# Altium footprint library BOARD_ADS _V2.0 (1).PcbLib: 14 footprints
Each footprint in its own frame and in the unit in brackets; x right, y up, seen from the top. Pads: shape width x height; smd on the part's side, far side on the other; paste and mask are expansions set on the pad; w line width, h text height; cw(c..) or ccw(c..) is an arc to the next point about the centre after c.
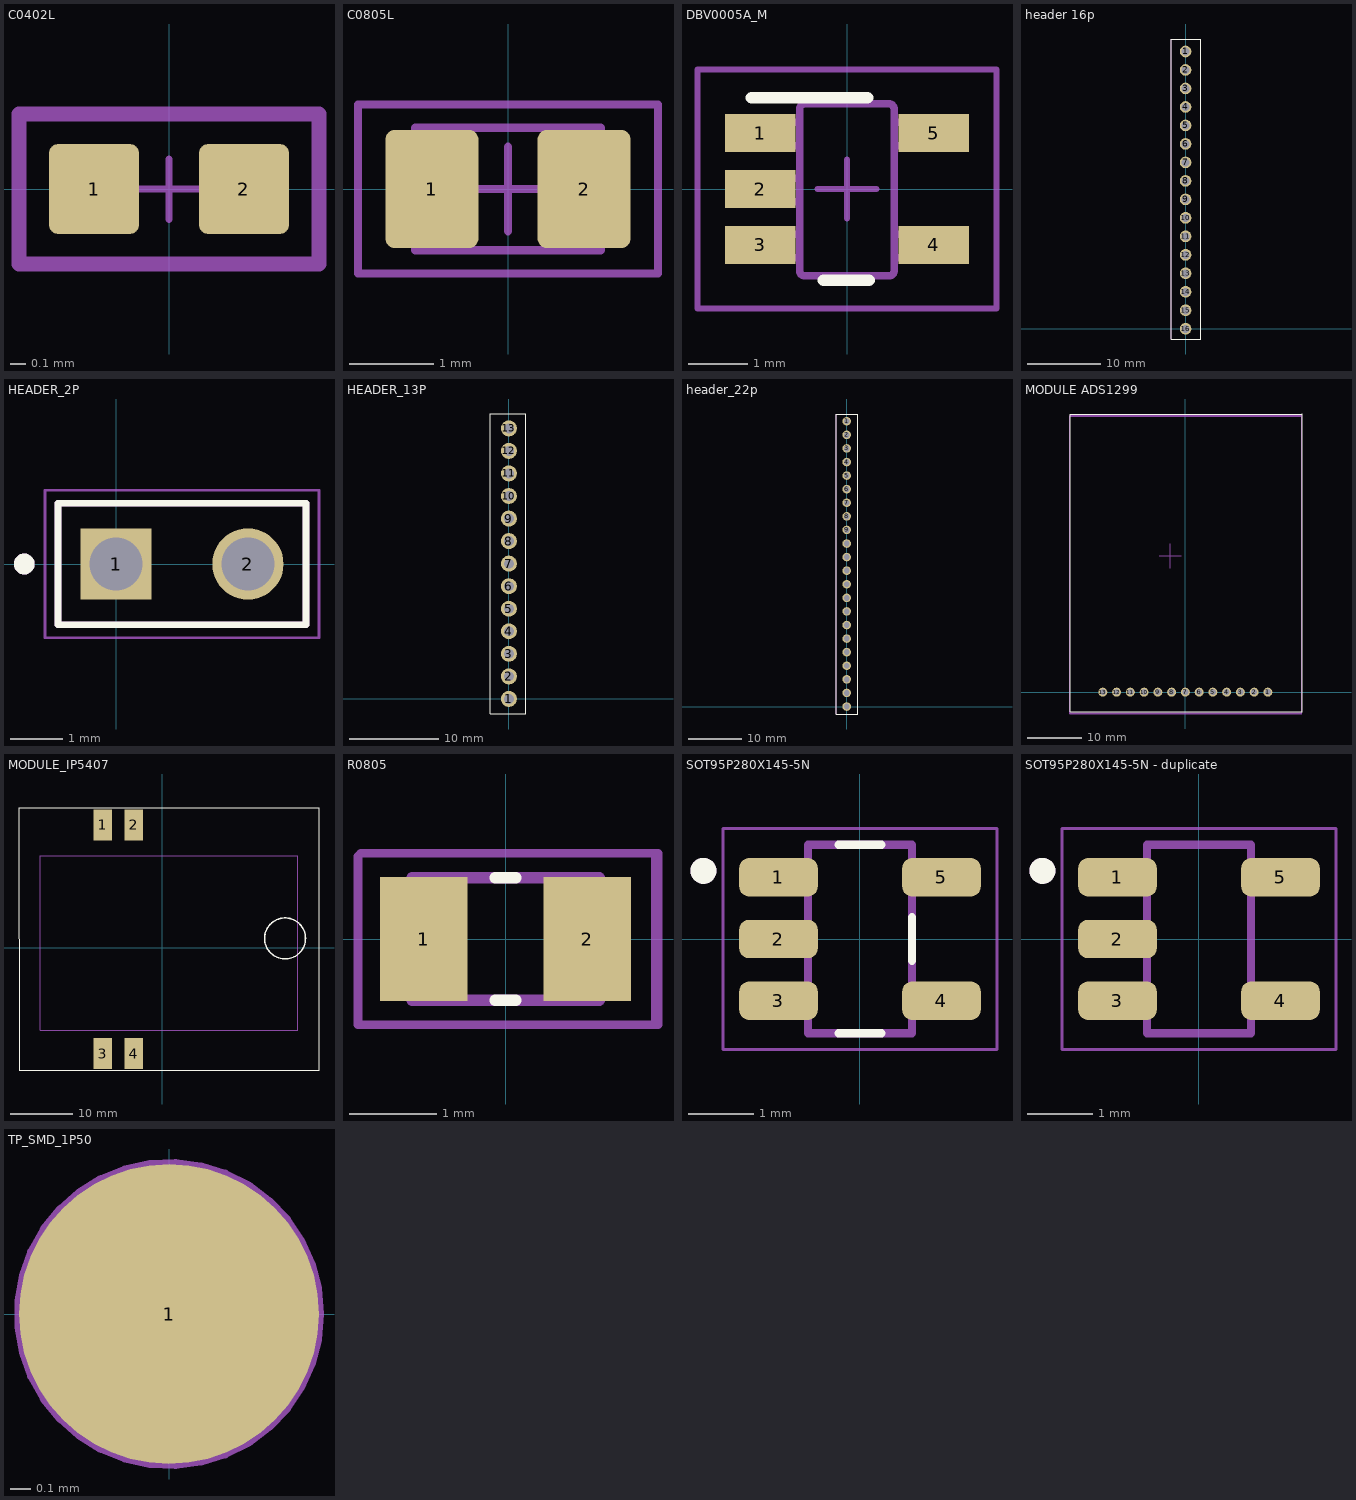
[diagram p0: the footprints below, top view; thin cyan lines are the x and y axes]

## C0402L [mm]
height 0.7
pads (2):
  rrect20% 0.6x0.6 smd paste+0.05 mask+0.05: 1(-0.5,0) 2(0.5,0)
Mechanical 5:
  lines w0.1: -1,-0.5 -1,0.5 1,0.5 1,-0.5 -1,-0.5
  text ".Designator" at -0.725,-0.225 h0.7
Top Component Center:
  lines w0.05: -0.2,0 0.2,0 ; 0,-0.2 0,0.2 ; -1,-0.5 -1,0.5 1,0.5 1,-0.5 -1,-0.5
3D body "User Library-Capacitor 0402.step": height 0.49, standoff -0.01, extent -0.5,-0.25 0.5,0.25

## C0805L [mm]
height 0.7
pads (2):
  rrect20% 1.1x1.4 smd mask+0.05: 1(-0.9,0) 2(0.9,0)
Mechanical 5:
  lines w0.1: -1.775,-1 1.775,-1 1.775,1 -1.775,1 -1.775,-1
  text ".Designator" at -1.357,-0.413 h1.32
Mechanical 13:
  lines w0.1: -0.65,-0.725 -0.65,0.725 ; 0.65,-0.725 0.65,0.725 ; -1.1,-0.725 1.1,-0.725 1.1,0.725 -1.1,0.725 -1.1,-0.725
Top Component Center:
  lines w0.1: -0.5,0 0.5,0 ; 0,-0.5 0,0.5 ; -1.775,-1 1.775,-1 1.775,1 -1.775,1 -1.775,-1
3D body: height 1.1, standoff 0, extent -1.099,-0.724 -0.651,0.724
3D body: height 1.1, standoff 0, extent -0.649,-0.724 0.649,0.724
3D body: height 1.1, standoff 0, extent 0.651,-0.724 1.099,0.724

## DBV0005A_M [mm]
pads (5):
  rect 1.2x0.65 smd paste+0 mask+0.051: 1(-1.475,0.95) 2(-1.475,0) 3(-1.475,-0.95) 4(1.475,-0.95) 5(1.475,0.95)
Top Overlay:
  lines w0.2: -1.625,1.55 0.35,1.55 ; -0.4,-1.55 0.375,-1.55
Mechanical 5:
  lines w0.1: -2.54,-2.032 2.54,-2.032 2.54,2.032 -2.54,2.032 -2.54,-2.032
  text ".Designator" at -0.635,-0.127 h1.52
Mechanical 13:
  lines w0.127: -0.801,1.371 cw(c-0.725,1.37) -0.725,1.446 ; -0.801,1.37 -0.801,-1.399 -0.801,-1.4 ccw(c-0.725,-1.399) -0.725,-1.475 ; -0.801,1.37 -0.801,1.371 ; -0.725,-1.475 -0.725,-1.475 ; -0.725,-1.475 0.723,-1.475 0.724,-1.475 ccw(c0.723,-1.399) 0.799,-1.4 0.799,-1.399 0.799,1.37 ; -0.725,1.446 0.723,1.446 0.724,1.446 cw(c0.723,1.37) 0.799,1.371 ; -0.725,1.446 -0.725,1.446 ; 0.799,1.37 0.799,1.371 ; -1.423,-1.167 -1.199,-1.167 -1.105,-1.167 -1.088,-1.167 -0.835,-1.167 -0.801,-1.167 -0.801,-0.767 -0.835,-0.767 -1.088,-0.767 -1.105,-0.767 -1.199,-0.767 -1.423,-0.767 -1.423,-1.167 ; -1.423,-0.215 -1.199,-0.215 -1.105,-0.215 -1.088,-0.215 -0.835,-0.215 -0.801,-0.215 -0.801,0.186 -0.835,0.186 -1.088,0.186 -1.105,0.186 -1.199,0.186 -1.423,0.186 -1.423,-0.215 ; -1.423,0.738 -1.199,0.738 -1.105,0.738 -1.088,0.738 -0.835,0.738 -0.801,0.738 -0.801,1.138 -0.835,1.138 -1.088,1.138 -1.105,1.138 -1.199,1.138 -1.423,1.138 -1.423,0.738 ; 0.799,-1.167 0.799,-0.767 0.834,-0.767 1.087,-0.767 1.103,-0.767 1.198,-0.767 1.422,-0.767 1.422,-1.167 1.198,-1.167 1.103,-1.167 1.087,-1.167 0.834,-1.167 0.799,-1.167 ; 0.799,0.738 0.799,1.138 0.834,1.138 1.087,1.138 1.103,1.138 1.198,1.138 1.422,1.138 1.422,0.738 1.198,0.738 1.103,0.738 1.087,0.738 0.834,0.738 0.799,0.738
Top Component Center:
  lines w0.05: -2.55,-2.05 -2.55,2.05 2.55,2.05 2.55,-2.05 -2.55,-2.05
  lines w0.1: -0.5,0 0.5,0 ; 0,-0.5 0,0.5
3D body "DBV0005A.stp": height 1.2, standoff 0, extent -1.4,-1.45 1.4,1.45

## header 16p [mm]
pads (16):
  round 1.6 hole 1.1 paste-2539.97: 1(0,38.1) 2(0,35.56) 3(0,33.02) 4(0,30.48) 5(0,27.94) 6(0,25.4) 7(0,22.86) 8(0,20.32) 9(0,17.78) 10(0,15.24) 11(0,12.7) 12(0,10.16) 13(0,7.62) 14(0,5.08) 15(0,2.54) 16(0,0)
Top Overlay:
  lines w0.1: -2,-1.4 -2,39.814 2.1,39.814 2.1,-1.4 -1.8,-1.4 -2,-1.4
Mechanical 5:
  lines w0.1: -2,-1.4 -2,39.8 2.108,39.8 2.108,-1.4 2,-1.4 -2,-1.4
  text ".Designator" at 0.054,18.062 h1.52

## HEADER_2P [mm]
pads (2):
  rect 1.37x1.37 / inner round 1.37 / far side rect 1.37x1.37 hole 1.02: 1(0,0)
  round 1.37 hole 1.02: 2(2.54,0)
Top Overlay:
  circle w0.2: c-1.768,0 r0.1
  lines w0.127: -1.118,-1.168 3.658,-1.168 3.658,1.168 -1.118,1.168 -1.118,-1.168
Mechanical 13:
  circle w0.2: c-1.768,0 r0.1
  lines w0.127: -1.118,-1.168 3.658,-1.168 ; -1.118,-1.168 3.658,-1.168 ; -1.118,-1.168 -1.118,1.168 3.658,1.168 3.658,-1.168
Top Component Center:
  lines w0.05: -1.368,-1.418 3.908,-1.418 3.908,1.418 -1.368,1.418 -1.368,-1.418
3D body "step_temp.STEP": height 10.03, standoff -2.79, extent -1.118,-1.168 3.658,1.168

## HEADER_13P [mm]
pads (13):
  round 1.8 hole 1.1 paste-2539.97: 1(0,0) 2(0,2.54) 3(0,5.08) 4(0,7.62) 5(0,10.16) 6(0,12.7) 7(0,15.24) 8(0,17.78) 9(0,20.32) 10(0,22.86) 11(0,25.4) 12(0,27.94) 13(0,30.48)
Top Overlay:
  lines w0.1: -2.1,-1.7 1.9,-1.7 1.9,32.1 -2.1,32.1 -2.1,-1.7

## header_22p [mm]
pads (22):
  round 1.6 hole 1.1 paste-2539.97: 1(0,53.34) 2(0,50.8) 3(0,48.26) 4(0,45.72) 5(0,43.18) 6(0,40.64) 7(0,38.1) 8(0,35.56) 9(0,33.02) 10(0,30.48) 11(0,27.94) 12(0,25.4) 13(0,22.86) 14(0,20.32) 15(0,17.78) 16(0,15.24) 17(0,12.7) 18(0,10.16) 19(0,7.62) 20(0,5.08) 21(0,2.54) 22(0,0)
Top Overlay:
  lines w0.1: -2,-1.4 -1.8,-1.4 2.1,-1.4 2.1,54.7 -2,54.7 -2,-1.4
Mechanical 5:
  lines w0.1: -2,54.7 -2,-1.4 2,-1.4 2.108,-1.4 2.108,54.692 -1.992,54.692
  text ".Designator" at 0.254,31.962 h1.52

## MODULE ADS1299 [mm]
pads (14):
  round 1.65 hole 1.1 paste-2539.97: 1(15.24,0) 1(15.24,0) 2(12.7,0) 3(10.16,0) 4(7.62,0) 5(5.08,0) 6(2.54,0) 7(0,0) 8(-2.54,0) 9(-5.08,0) 10(-7.62,0) 11(-10.16,0) 12(-12.7,0) 13(-15.24,0)
Top Overlay:
  lines w0.1: 21.631,51.354 -21.295,51.354 -21.295,-3.637 21.631,-3.637 21.631,51.363
Mechanical 5:
  lines w0.1: -21.395,-4.037 21.531,-4.037 21.531,50.954 -21.395,50.954 -21.395,-4.037
Top Component Center:
  lines w0.1: -21.395,-3.837 21.531,-3.837 21.531,51.154 -21.395,51.154 ; -4.826,25.146 -0.762,25.146 ; -2.794,22.86 -2.794,27.432
3D body "LK-M1299-V1.3_3D??.step": height 9.7, standoff -6.2, extent -21.412,-3.563 21.542,51.368

## MODULE_IP5407 [mm]
pads (4):
  rect 3x5 smd paste-2539.97: 1(-9.6,19.8) 2(-4.6,19.8) 3(-9.6,-17.1) 4(-4.6,-17.1)
Top Overlay:
  circle w0.254: c19.8,1.5 r3.302
  lines w0.1: -23.114,-19.8 -23.114,22.6 25.273,22.6 25.273,-19.8 -23.114,-19.8
Mechanical 5:
  lines w0.1: -19.685,-13.335 -19.685,14.8 21.844,14.8 21.844,-13.335 -19.685,-13.335
  text ".Designator" at -0.646,0.562 h1.52
3D body "PCB_PWR_BANK_V3.0_014-007930B.step": height 4.66, standoff -1.05, extent -19.759,-13.208 21.791,14.792

## PCBComponent_1 [mm]

## R0805 [mm]
pads (2):
  rect 1x1.42 smd: 1(-0.935,0) 2(0.935,0)
Top Overlay:
  lines w0.127: -0.12,-0.7 0.12,-0.7 ; -0.12,0.7 0.12,0.7
Mechanical 5:
  lines w0.1: -1.688,-0.979 1.741,-0.979 1.741,0.979 -1.655,0.979 -1.663,0.971 -1.679,0.955 -1.688,0.947 -1.688,-0.979
  text ".Designator" at -0.254,-0.127 h1.52
Mechanical 13:
  lines w0.127: -1.07,-0.7 -1.07,0.7 1.07,0.7 1.07,-0.7 -1.07,-0.7
Top Component Center:
  lines w0.05: -1.685,-0.96 -1.685,0.96 1.685,0.96 1.685,-0.96 -1.685,-0.96
3D body "step_temp.STEP": height 0.6, standoff 0, extent -1,-0.625 1,0.625

## SOT95P280X145-5N [mm]
pads (5):
  rrect50% 1.21x0.59 smd: 1(-1.255,0.95) 2(-1.255,0) 3(-1.255,-0.95) 4(1.255,-0.95) 5(1.255,0.95)
Top Overlay:
  circle w0.2: c-2.41,1.05 r0.1
  lines w0.127: -0.33,-1.45 0.33,-1.45 ; -0.33,1.45 0.33,1.45 ; 0.8,-0.335 0.8,0.335
Mechanical 13:
  circle w0.2: c-2.41,1.05 r0.1
  lines w0.127: -0.8,-1.45 -0.8,1.45 0.8,1.45 0.8,-1.45 -0.8,-1.45
Top Component Center:
  lines w0.05: -2.11,-1.7 2.11,-1.7 2.11,1.7 -2.11,1.7 -2.11,-1.7
3D body "step_temp.STEP": height 1.45, standoff 0, extent -1.4,-1.45 1.4,1.45

## SOT95P280X145-5N - duplicate [mm]
pads (5):
  rrect50% 1.21x0.59 smd: 1(-1.255,0.95) 2(-1.255,0) 3(-1.255,-0.95) 4(1.255,-0.95) 5(1.255,0.95)
Top Overlay:
  circle w0.2: c-2.41,1.05 r0.1
Mechanical 13:
  circle w0.2: c-2.41,1.05 r0.1
  lines w0.127: -0.8,-1.45 0.8,-1.45 0.8,1.45 -0.8,1.45 -0.8,-1.45
Top Component Center:
  lines w0.05: -2.11,-1.7 -2.11,1.7 2.11,1.7 2.11,-1.7 -2.11,-1.7
3D body "step_temp.STEP": height 1.45, standoff 0, extent -1.4,-1.45 1.4,1.45

## TP_SMD_1P50 [mm] "Single 1.50 mm round top-layer copper test point for probing"
pads (1):
  round 1.5 smd: 1(0,0)
Mechanical 1:
  circle w0.051: c0,0 r0.75